# Altium schematic symbol library F101S3_KSDIY_V2.SchLib: 58 symbols
Pins are listed as number, name and electrical type; pins without a type are passive.

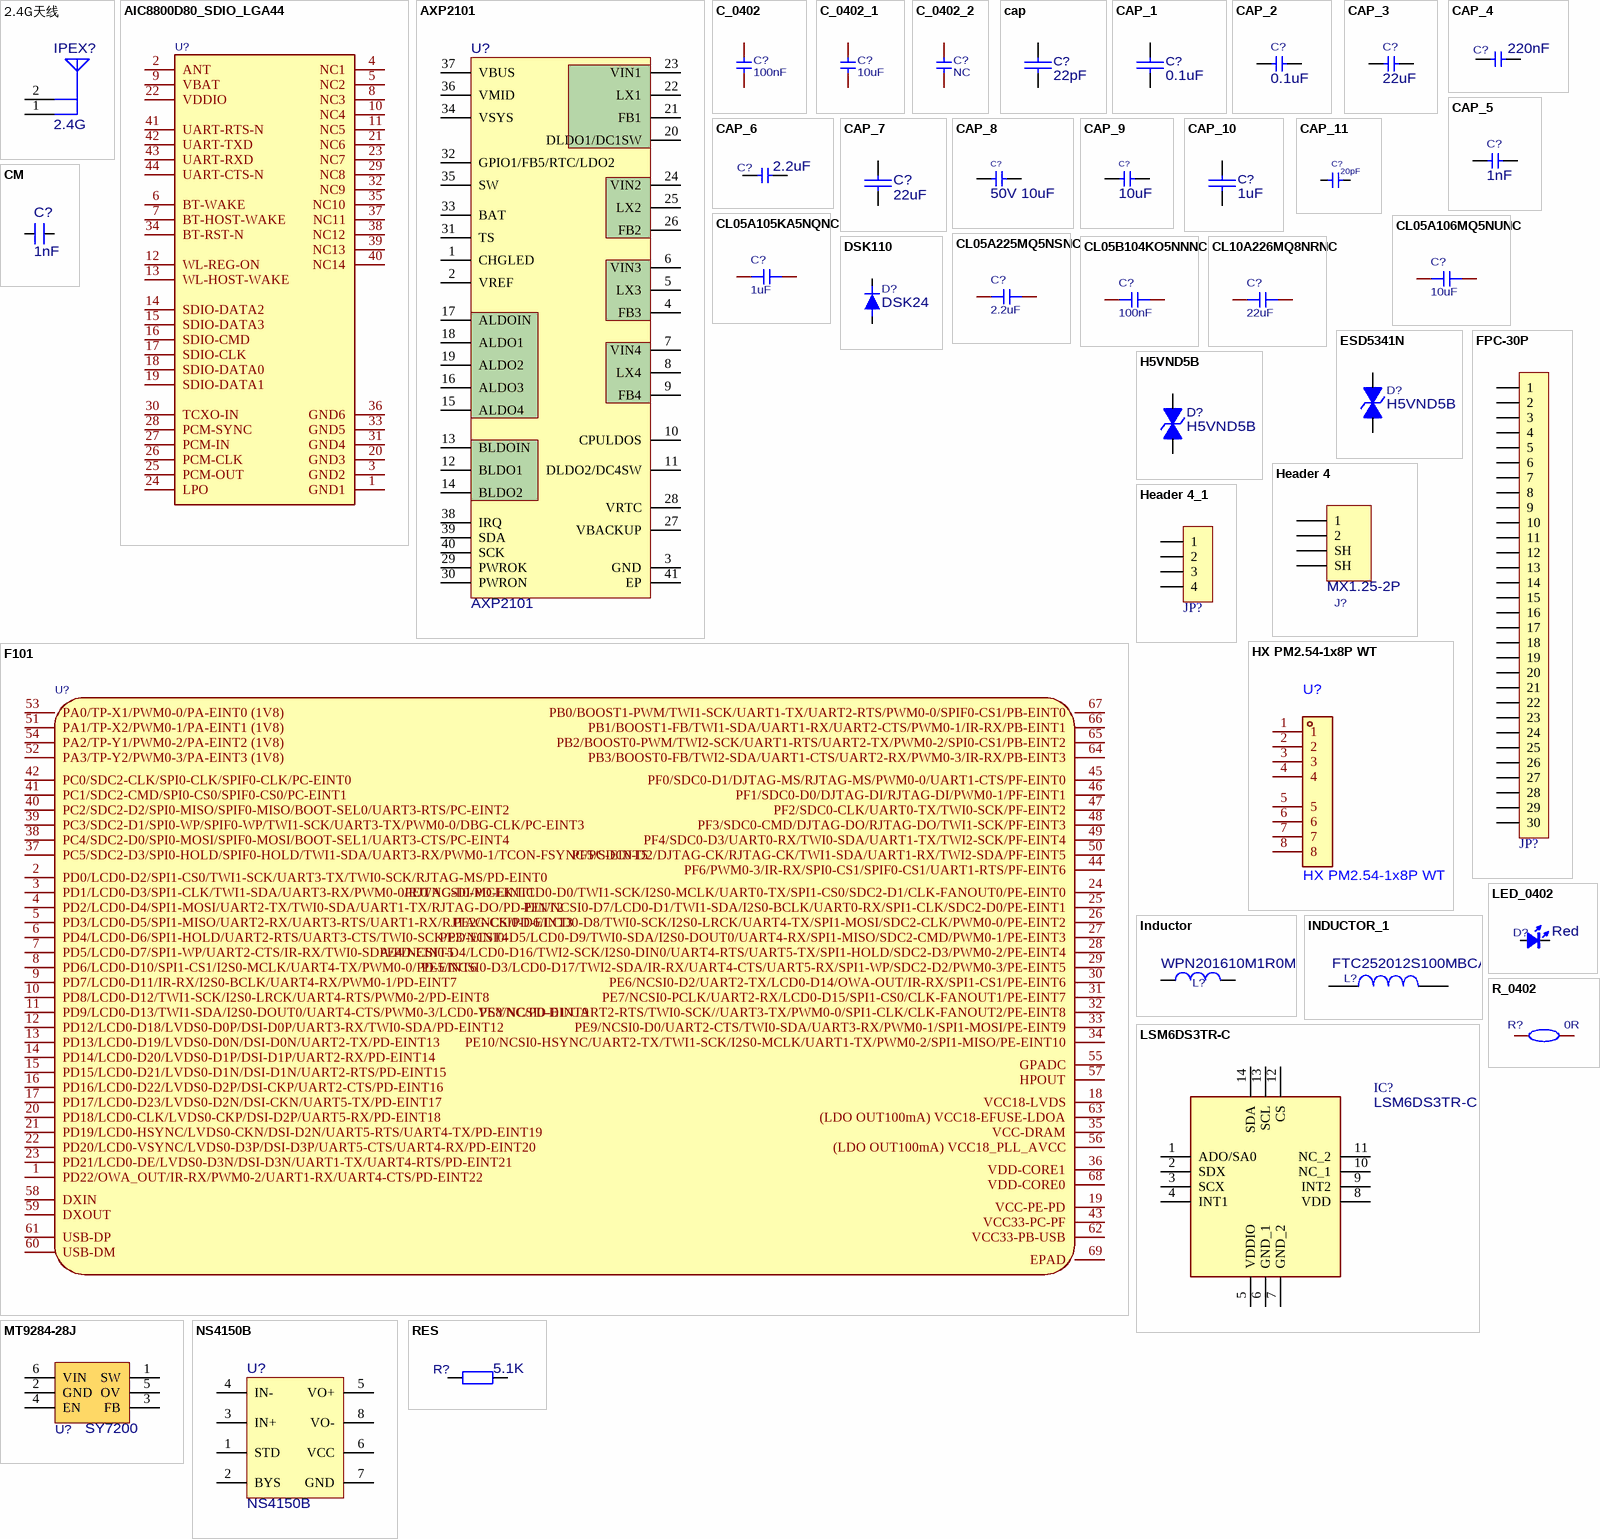
[diagram p0: symbols 2.4G天线 to RES]

## 2.4G天线
designator IPEX?, comment 2.4G
SMA-板载2.4G射频天线https://item.szlcsc.com/3441431.html?fromZone=s_s__%2522ipex1%2522; 版权归属: 源创客; BOM名称: 板载2.4G射频天线; 学习资源: www.ooocke.com
footprint SMA_IPEX
pins: 1 ANT, 2 GND

## AIC8800D80_SDIO_LGA44
designator U?
AIC8800D80 SDIO WiFi/BT module, LGA-44. Symbol from YuzukiNeko baseboard U3; footprint from BL-M8800MT1-40B - verify against module datasheet; Symbol: AIC8800D80_SDIO_LGA44; Add into BOM: yes; PCB Layer: Default; Device: AIC8800D80_SDIO_LGA44; Convert to PCB: yes; Value: AIC8800D80; FootprintName: WIRELM-SMD_BL-M8800MT1-40B
footprint WIRELM-SMD_BL-M8800MT1-40B
pins: 1 GND1, 2 ANT, 3 GND2, 4 NC1, 5 NC2, 6 BT-WAKE, 7 BT-HOST-WAKE, 8 NC3, 9 VBAT, 10 NC4, 11 NC5, 12 WL-REG-ON, 13 WL-HOST-WAKE, 14 SDIO-DATA2, 15 SDIO-DATA3, 16 SDIO-CMD, 17 SDIO-CLK, 18 SDIO-DATA0, 19 SDIO-DATA1, 20 GND3, 21 NC6, 22 VDDIO, 23 NC7, 24 LPO, 25 PCM-OUT, 26 PCM-CLK, 27 PCM-IN, 28 PCM-SYNC, 29 NC8, 30 TCXO-IN, 31 GND4, 32 NC9, 33 GND5, 34 BT-RST-N, 35 NC10, 36 GND6, 37 NC11, 38 NC12, 39 NC13, 40 NC14, 41 UART-RTS-N, 42 UART-TXD, 43 UART-RXD, 44 UART-CTS-N

## AXP2101
designator U?
A PMU designed by Allwinner; Manufacturer: x-powers; Add into BOM: yes; Symbol: AXP2101; Device: AXP2101; LCSC Part Name: AXP2101; Supplier Part: C3036461; Manufacturer Part: AXP2101; Supplier Footprint: QFN-40-EP(5x5); JLCPCB Part Class: 扩展库; Supplier: LCSC; Convert to PCB: yes
footprint QFN-40_L5.0-W5.0-P0.40-TL-EP3.4
3D model QFN-40_L5.0-W5.0-H0.9-P0.4-TL-EP
pins: 1 CHGLED, 2 VREF, 3 GND, 4 FB3, 5 LX3, 6 VIN3, 7 VIN4, 8 LX4, 9 FB4, 10 CPULDOS, 11 DLDO2/DC4SW, 12 BLDO1, 13 BLDOIN, 14 BLDO2, 15 ALDO4, 16 ALDO3, 17 ALDOIN, 18 ALDO1, 19 ALDO2, 20 DLDO1/DC1SW, 21 FB1, 22 LX1, 23 VIN1, 24 VIN2, 25 LX2, 26 FB2, 27 VBACKUP, 28 VRTC, 29 PWROK, 30 PWRON, 31 TS, 32 GPIO1/FB5/RTC/LDO2, 33 BAT, 34 VSYS, 35 SW, 36 VMID, 37 VBUS, 38 IRQ, 39 SDA, 40 SCK, 41 EP

## C_0402
designator C?, comment 100nF
Symbol: CAP; Device: C_0402; Add into BOM: yes; PCB Layer: Default; Origin 3D Model Title: CAPC1005X05L; Origin Footprint: CAP_0402 - G; ModelTransform: v2:[39.37007874015748,-9.642888182262625e-15,0,9.642888182262625e-15,39.37007874015748,0,0,0,39.37007874015748,0.0034,0.0032,0.5]; Convert to PCB: yes; Value: 100nF; FootprintName: CAP_0402 - G
footprint CAP_0402 - G
pins: 1, 2

## C_0402_1
designator C?, comment 10uF
Symbol: CAP; Device: C_0402; Add into BOM: yes; PCB Layer: Default; Origin 3D Model Title: CAPC1005X05L; Origin Footprint: CAP_0402 - G; ModelTransform: v2:[39.37007874015748,-9.642888182262625e-15,0,9.642888182262625e-15,39.37007874015748,0,0,0,39.37007874015748,0.0034,0.0032,0.5]; Convert to PCB: yes; Value: 10uF; FootprintName: CAP_0402 - G
footprint CAP_0402 - G
pins: 1, 2

## C_0402_2
designator C?, comment NC
Symbol: CAP; Device: C_0402; Add into BOM: yes; PCB Layer: Default; Origin 3D Model Title: CAPC1005X05L; Origin Footprint: CAP_0402 - G; ModelTransform: v2:[39.37007874015748,-9.642888182262625e-15,0,9.642888182262625e-15,39.37007874015748,0,0,0,39.37007874015748,0.0034,0.0032,0.5]; Convert to PCB: yes; Value: NC; FootprintName: CAP_0402 - G
footprint CAP_0402 - G
pins: 1, 2

## cap
designator C?, comment 22pF
footprint CAP_0402 - G
pins: 1, 2

## CAP_1
designator C?, comment 0.1uF
footprint CAP_0402 - G
pins: 1, 2

## CAP_2
designator C?, comment 0.1uF
Capacitor
footprint CAP_0402 - G
pins: 1, 2

## CAP_3
designator C?, comment 22uF
Capacitor
footprint 0603-C (Murata & TDK 0603,25V,±10%,X7R,SERAMIC)
pins: 1, 2

## CAP_4
designator C?, comment 220nF
Capacitor
footprint CAP_0402 - G
pins: 1, 2

## CAP_5
designator C?, comment 1nF
Capacitor
footprint CAP_0402 - G
pins: 1, 2

## CAP_6
designator C?, comment 2.2uF
Capacitor
footprint CAP_0402 - G
pins: 1, 2

## CAP_7
designator C?, comment 22uF
footprint 0603-C (Murata & TDK 0603,25V,±10%,X7R,SERAMIC)
pins: 1, 2

## CAP_8
designator C?, comment 50V 10uF
Capacitor
footprint 1206-C
pins: 1, 2

## CAP_9
designator C?, comment 10uF
Capacitor
footprint 0603-C (Murata & TDK 0603,25V,±10%,X7R,SERAMIC)
pins: 1, 2

## CAP_10
designator C?, comment 1uF
footprint CAP_0402 - G
pins: 1, 2

## CAP_11
designator C?, comment 20pF
Capacitor
footprint CAP_0402 - G
pins: 1, 2

## CL05A105KA5NQNC
designator C?, comment 1uF
容值:1uF;精度:±10%;额定电压:25V;温度系数:X5R;; Manufacturer: SAMSUNG(三星); Symbol: Capacitance; Device: CL05A105KA5NQNC; 3D Model: 36a51122f27c49738f86b3bfa98863e0聨0819f05c4eef4c71ace90d822a990e87; 3D Model Transform: 39.37,19.685,0,0,0,0,0,0,0; Add into BOM: yes; Tolerance: ±10%; Voltage Rating: 25V; Temperature Coefficient: X5R; PCB Layer: Default; ModelName: C0402_L1.0-W0.5-H0.5; Supplier Footprint: 0402; Value: 1uF; Convert to PCB: yes; LCSC Part Name: 1uF ±10% 25V; Supplier Part: C52923; Manufacturer Part: CL05A105KA5NQNC; JLCPCB Part Class: Basic Part; Datasheet: https://item.szlcsc.com/datasheet/CL05A105KA5NQNC/53938.html; Supplier: LCSC; FootprintName: C0402-NSK
footprint CAP_0402 - G
3D model C0402_L1.0-W0.5-H0.5
pins: 1, 2

## CL05A106MQ5NUNC
designator C?, comment 10uF
容值:10uF;精度:±20%;额定电压:6.3V;温度系数:X5R;; Manufacturer: SAMSUNG(三星); Symbol: Capacitance; Device: CL05A106MQ5NUNC; 3D Model: 36a51122f27c49738f86b3bfa98863e0聨0819f05c4eef4c71ace90d822a990e87; 3D Model Transform: 39.37,19.685,0,0,0,0,0,0,0; Add into BOM: yes; Tolerance: ±20%; Voltage Rating: 6.3V; Temperature Coefficient: X5R; PCB Layer: Default; ModelName: C0402_L1.0-W0.5-H0.5; Supplier Footprint: 0402; Value: 10uF; Convert to PCB: yes; LCSC Part Name: 10uF ±20% 6.3V; Supplier Part: C15525; Manufacturer Part: CL05A106MQ5NUNC; JLCPCB Part Class: Basic Part; Datasheet: https://item.szlcsc.com/datasheet/CL05A106MQ5NUNC/16204.html; Supplier: LCSC; FootprintName: C0402-NSK
footprint CAP_0402 - G
3D model C0402_L1.0-W0.5-H0.5
pins: 1, 2

## CL05A225MQ5NSNC
designator C?, comment 2.2uF
容值:2.2uF;精度:±20%;额定电压:6.3V;温度系数:X5R;; Manufacturer: SAMSUNG(三星); Symbol: Capacitance; Device: CL05A225MQ5NSNC; 3D Model: 36a51122f27c49738f86b3bfa98863e0聨0819f05c4eef4c71ace90d822a990e87; 3D Model Transform: 39.37,19.685,0,0,0,0,0,0,0; Add into BOM: yes; Tolerance: ±20%; Voltage Rating: 6.3V; Temperature Coefficient: X5R; PCB Layer: Default; ModelName: C0402_L1.0-W0.5-H0.5; Supplier Footprint: 0402; Value: 2.2uF; Convert to PCB: yes; LCSC Part Name: 2.2uF ±20% 6.3V; Supplier Part: C12530; Manufacturer Part: CL05A225MQ5NSNC; JLCPCB Part Class: Basic Part; Datasheet: https://item.szlcsc.com/datasheet/CL05A225MQ5NSNC/13164.html; Supplier: LCSC; FootprintName: C0402-NSK
footprint CAP_0402 - G
3D model C0402_L1.0-W0.5-H0.5
pins: 1, 2

## CL05B104KO5NNNC
designator C?, comment 100nF
容值:100nF;精度:±10%;额定电压:16V;温度系数:X7R;; Manufacturer: SAMSUNG(三星); Symbol: Capacitance; Device: CL05B104KO5NNNC; 3D Model: 36a51122f27c49738f86b3bfa98863e0聨0819f05c4eef4c71ace90d822a990e87; 3D Model Transform: 39.37,19.685,0,0,0,0,0,0,0; Add into BOM: yes; Tolerance: ±10%; Voltage Rating: 16V; Temperature Coefficient: X7R; PCB Layer: Default; ModelName: C0402_L1.0-W0.5-H0.5; Supplier Footprint: 0402; Value: 100nF; Convert to PCB: yes; LCSC Part Name: 100nF ±10% 16V; Supplier Part: C1525; Manufacturer Part: CL05B104KO5NNNC; JLCPCB Part Class: Basic Part; Datasheet: https://item.szlcsc.com/datasheet/CL05B104KO5NNNC/1877.html; Supplier: LCSC; FootprintName: C0402-NSK
footprint CAP_0402 - G
3D model C0402_L1.0-W0.5-H0.5
pins: 1, 2

## CL10A226MQ8NRNC
designator C?, comment 22uF
容值:22uF;精度:±20%;额定电压:6.3V;温度系数:X5R;; Manufacturer: SAMSUNG(三星); Symbol: Capacitance; Device: CL10A226MQ8NRNC; Add into BOM: yes; 3D Model: ac125912035d415993ca9572d50418b1; 3D Model Transform: 62.992,31.496,0,0,0,0,0,0,0; Tolerance: ±20%; Voltage Rating: 6.3V; Temperature Coefficient: X5R; PCB Layer: Default; ModelName: C0603_L1.6-W0.8-H0.8; Convert to PCB: yes; Value: 22uF; Supplier Footprint: 0603; LCSC Part Name: 22uF ±20% 6.3V; Supplier Part: C59461; Manufacturer Part: CL10A226MQ8NRNC; JLCPCB Part Class: Basic Part; Datasheet: https://item.szlcsc.com/datasheet/CL10A226MQ8NRNC/60514.html; Supplier: LCSC; FootprintName: C0603-NSK
footprint 0603-C (Murata & TDK 0603,25V,±10%,X7R,SERAMIC)
3D model C0603_L1.6-W0.8-H0.8
pins: 1, 2

## CM
designator C?, comment 1nF
Cap SMD; Value: 103
footprint CAP_0402 - G
pins: 1, 2

## DSK110
designator D?, comment DSK24
footprint SOD-123F (二极管); pin to pad A>1 K>2
pins: A, K

## ESD5341N
designator D?, comment H5VND5B
ESD二极管-单向
footprint SOD-523F_L1.7-W0.9-LS1.7-BI
pins: 1, 2

## F101
designator U?
Symbol: F101; Add into BOM: yes; PCB Layer: Default; ModelId: f133f686dbbc4c2a801de1546189e211聨0819f05c4eef4c71ace90d822a990e87; ModelName: QFN-68_L7.0-W7.0-P0.35-TL-EP4.5; ModelTransform: 276.3773992490768,276.3773992490768,30.70859960693866,0,0,0,0,0,0; Device: F101; Convert to PCB: yes; FootprintName: QFN-68_L7.0-W7.0-P0.35-TL-EP4.5
footprint QFN-68_L7.0-W7.0-P0.35-TL-EP4.5
pins: 1 PD22/OWA_OUT/IR-RX/PWM0-2/UART1-RX/UART4-CTS/PD-EINT22, 2 PD0/LCD0-D2/SPI1-CS0/TWI1-SCK/UART3-TX/TWI0-SCK/RJTAG-MS/PD-EINT0, 3 PD1/LCD0-D3/SPI1-CLK/TWI1-SDA/UART3-RX/PWM0-0/RJTAG-DI/PD-EINT1, 4 PD2/LCD0-D4/SPI1-MOSI/UART2-TX/TWI0-SDA/UART1-TX/RJTAG-DO/PD-EINT2, 5 PD3/LCD0-D5/SPI1-MISO/UART2-RX/UART3-RTS/UART1-RX/RJTAG-CK/PD-EINT3, 6 PD4/LCD0-D6/SPI1-HOLD/UART2-RTS/UART3-CTS/TWI0-SCK/PD-EINT4, 7 PD5/LCD0-D7/SPI1-WP/UART2-CTS/IR-RX/TWI0-SDA/PD-EINT5, 8 PD6/LCD0-D10/SPI1-CS1/I2S0-MCLK/UART4-TX/PWM0-0/PD-EINT6, 9 PD7/LCD0-D11/IR-RX/I2S0-BCLK/UART4-RX/PWM0-1/PD-EINT7, 10 PD8/LCD0-D12/TWI1-SCK/I2S0-LRCK/UART4-RTS/PWM0-2/PD-EINT8, 11 PD9/LCD0-D13/TWI1-SDA/I2S0-DOUT0/UART4-CTS/PWM0-3/LCD0-VSYNC/PD-EINT9, 12 PD12/LCD0-D18/LVDS0-D0P/DSI-D0P/UART3-RX/TWI0-SDA/PD-EINT12, 13 PD13/LCD0-D19/LVDS0-D0N/DSI-D0N/UART2-TX/PD-EINT13, 14 PD14/LCD0-D20/LVDS0-D1P/DSI-D1P/UART2-RX/PD-EINT14, 15 PD15/LCD0-D21/LVDS0-D1N/DSI-D1N/UART2-RTS/PD-EINT15, 16 PD16/LCD0-D22/LVDS0-D2P/DSI-CKP/UART2-CTS/PD-EINT16, 17 PD17/LCD0-D23/LVDS0-D2N/DSI-CKN/UART5-TX/PD-EINT17, 18 VCC18-LVDS, 19 VCC-PE-PD, 20 PD18/LCD0-CLK/LVDS0-CKP/DSI-D2P/UART5-RX/PD-EINT18, 21 PD19/LCD0-HSYNC/LVDS0-CKN/DSI-D2N/UART5-RTS/UART4-TX/PD-EINT19, 22 PD20/LCD0-VSYNC/LVDS0-D3P/DSI-D3P/UART5-CTS/UART4-RX/PD-EINT20, 23 PD21/LCD0-DE/LVDS0-D3N/DSI-D3N/UART1-TX/UART4-RTS/PD-EINT21, 24 PE0/NCSI0-MCLK/LCD0-D0/TWI1-SCK/I2S0-MCLK/UART0-TX/SPI1-CS0/SDC2-D1/CLK-FANOUT0/PE-EINT0, 25 PE1/NCSI0-D7/LCD0-D1/TWI1-SDA/I2S0-BCLK/UART0-RX/SPI1-CLK/SDC2-D0/PE-EINT1, 26 PE2/NCSI0-D6/LCD0-D8/TWI0-SCK/I2S0-LRCK/UART4-TX/SPI1-MOSI/SDC2-CLK/PWM0-0/PE-EINT2, 27 PE3/NCSI0-D5/LCD0-D9/TWI0-SDA/I2S0-DOUT0/UART4-RX/SPI1-MISO/SDC2-CMD/PWM0-1/PE-EINT3, 28 PE4/NCSI0-D4/LCD0-D16/TWI2-SCK/I2S0-DIN0/UART4-RTS/UART5-TX/SPI1-HOLD/SDC2-D3/PWM0-2/PE-EINT4, 29 PE5/NCSI0-D3/LCD0-D17/TWI2-SDA/IR-RX/UART4-CTS/UART5-RX/SPI1-WP/SDC2-D2/PWM0-3/PE-EINT5, 30 PE6/NCSI0-D2/UART2-TX/LCD0-D14/OWA-OUT/IR-RX/SPI1-CS1/PE-EINT6, 31 PE7/NCSI0-PCLK/UART2-RX/LCD0-D15/SPI1-CS0/CLK-FANOUT1/PE-EINT7, 32 PE8/NCSI0-D1/UART2-RTS/TWI0-SCK//UART3-TX/PWM0-0/SPI1-CLK/CLK-FANOUT2/PE-EINT8, 33 PE9/NCSI0-D0/UART2-CTS/TWI0-SDA/UART3-RX/PWM0-1/SPI1-MOSI/PE-EINT9, 34 PE10/NCSI0-HSYNC/UART2-TX/TWI1-SCK/I2S0-MCLK/UART1-TX/PWM0-2/SPI1-MISO/PE-EINT10, 35 VCC-DRAM, 36 VDD-CORE1, 37 PC5/SDC2-D3/SPI0-HOLD/SPIF0-HOLD/TWI1-SDA/UART3-RX/PWM0-1/TCON-FSYNC/PC-EINT5, 38 PC4/SDC2-D0/SPI0-MOSI/SPIF0-MOSI/BOOT-SEL1/UART3-CTS/PC-EINT4, 39 PC3/SDC2-D1/SPI0-WP/SPIF0-WP/TWI1-SCK/UART3-TX/PWM0-0/DBG-CLK/PC-EINT3, 40 PC2/SDC2-D2/SPI0-MISO/SPIF0-MISO/BOOT-SEL0/UART3-RTS/PC-EINT2, 41 PC1/SDC2-CMD/SPI0-CS0/SPIF0-CS0/PC-EINT1, 42 PC0/SDC2-CLK/SPI0-CLK/SPIF0-CLK/PC-EINT0, 43 VCC33-PC-PF, 44 PF6/PWM0-3/IR-RX/SPI0-CS1/SPIF0-CS1/UART1-RTS/PF-EINT6, 45 PF0/SDC0-D1/DJTAG-MS/RJTAG-MS/PWM0-0/UART1-CTS/PF-EINT0, 46 PF1/SDC0-D0/DJTAG-DI/RJTAG-DI/PWM0-1/PF-EINT1, 47 PF2/SDC0-CLK/UART0-TX/TWI0-SCK/PF-EINT2, 48 PF3/SDC0-CMD/DJTAG-DO/RJTAG-DO/TWI1-SCK/PF-EINT3, 49 PF4/SDC0-D3/UART0-RX/TWI0-SDA/UART1-TX/TWI2-SCK/PF-EINT4, 50 PF5/SDC0-D2/DJTAG-CK/RJTAG-CK/TWI1-SDA/UART1-RX/TWI2-SDA/PF-EINT5, 51 PA1/TP-X2/PWM0-1/PA-EINT1 (1V8), 52 PA3/TP-Y2/PWM0-3/PA-EINT3 (1V8), 53 PA0/TP-X1/PWM0-0/PA-EINT0 (1V8), 54 PA2/TP-Y1/PWM0-2/PA-EINT2 (1V8), 55 GPADC, 56 (LDO OUT100mA) VCC18_PLL_AVCC, 57 HPOUT, 58 DXIN, 59 DXOUT, 60 USB-DM, 61 USB-DP, 62 VCC33-PB-USB, 63 (LDO OUT100mA) VCC18-EFUSE-LDOA, 64 PB3/BOOST0-FB/TWI2-SDA/UART1-CTS/UART2-RX/PWM0-3/IR-RX/PB-EINT3, 65 PB2/BOOST0-PWM/TWI2-SCK/UART1-RTS/UART2-TX/PWM0-2/SPI0-CS1/PB-EINT2, 66 PB1/BOOST1-FB/TWI1-SDA/UART1-RX/UART2-CTS/PWM0-1/IR-RX/PB-EINT1, 67 PB0/BOOST1-PWM/TWI1-SCK/UART1-TX/UART2-RTS/PWM0-0/SPIF0-CS1/PB-EINT0, 68 VDD-CORE0, 69 EPAD

## FPC-30P
designator JP?, comment FPC1.0-30P  (value not drawn)
FPC连接器; 版权归属: 源创客; BOM名称: FPC连接器; 学习资源: www.ooocke.com
footprint FPC1.25A-LI-30P (Footprint not found)
footprint FPC0.5 2H-WS-30P (长：19.2mm，宽：5.2mm，高：2mm)
footprint FPC1.0-2H-WS-30P (翻盖FPC，脚距1mm，不含脚（长34.9mm，宽5.2mm，高1.96mm）)
pins: 1, 2, 3, 4, 5, 6, 7, 8, 9, 10, 11, 12, 13, 14, 15, 16, 17, 18, 19, 20, 21, 22, 23, 24, 25, 26, 27, 28, 29, 30

## H5VND5B
designator D?
ESD二极管-单向
footprint SOD-523F_L1.7-W0.9-LS1.7-BI
pins: 1, 2

## Header 4
designator J?, comment MX1.25-2P
Header, 4-Pin; LatestRevisionDate: 17-Jul-2002; LatestRevisionNote: Re-released for DXP Platform.; Publisher: Altium Limited
signal-integrity model Connector
footprint MX 1.25-WS-2P (长：7.65mm，宽：4.2mm，高：3.4mm)
pins: 0 SH, 0 SH, 1, 2

## Header 4_1
designator JP?, comment HDR-1X4  (value not drawn)
4P接插件; 版权归属: 源创客; BOM名称: 4P接插件; 学习资源: www.ooocke.com
footprint MX 1.25-WI-4P (长：6.75mm，宽：1.8mm，高：3.3mm)
footprint MX 1.25-LI-4P (长：6.75mm，宽：3.2mm，高：4.2mm)
footprint MX 1.25-WS-4P (长：10.15mm，宽：4.2mm，高：3.4mm)
footprint MX 1.25-LS-4P (长：9.75m，宽：3.7mm，高：4.7mm)
pins: 1, 2, 3, 4

## HX PM2.54-1x8P WT
designator U?
配套排针：HX PZ2.54-1x8P系列 1x8P 间距:2.54mm 卧贴 / 插孔结构:1x8P / 间距:2.54mm / 行距:- / 圆孔/方孔:方孔 / 安装方式:卧贴 / 排数:单排 / 总孔位数:8P / 额定电流:3A / 额定电压:1kV / 插孔方向:顶部 / 塑高:8.5mm / 触头材质:黄铜 / 触头镀层:金 / 工作温度:-40℃~+105℃ / 型号:HX PM2.54-1x8P WT / LCSC C46061772 / 厂牌:hanxia(韩下)
footprint HDR-SMD_8P-P2.54-H-F-W8.5 (PCB footprint)
pins: 1, 2, 3, 4, 5, 6, 7, 8

## Inductor
designator L?, comment WPN201610M1R0MT
贴片功率电感 2.2uH-20%-252010(2.5*2.0*1.0mm); Code_IEC: 1005; Published: 8-Jun-2000; LatestRevisionDate: 17-Jul-2002; LatestRevisionNote: Re-released for DXP Platform.; PackageReference: 0402-A; Publisher: Altium Limited; Code_JEITA: 0402
footprint IND_CB2518_MM
pins: 1, 2

## INDUCTOR_1
designator L?, comment FTC252012S100MBCA
footprint IND_CB2518_MM
pins: 1, 2

## LED_0402
designator D?, comment Red
LED
footprint 0603/1608-LED
pins: 1 A, 2 K

## LSM6DS3TR-C
designator IC?
Integrated Circuit; Manufacturer_Name: STMicroelectronics; Datasheet Link: http://www.st.com/resource/en/datasheet/lsm6ds3tr-c.pdf; Manufacturer_Part_Number: LSM6DS3TR-C; Mouser Part Number: 511-LSM6DS3TR-C; Mouser Price/Stock: https://www.mouser.co.uk/ProductDetail/STMicroelectronics/LSM6DS3TR-C?qs=u4fy%2FsgLU9NHwPlhP3LTBw%3D%3D; Arrow Part Number: LSM6DS3TR-C; Arrow Price/Stock: https://www.arrow.com/en/products/lsm6ds3tr-c/stmicroelectronics?region=nac
footprint LGA-14(2.5X3X0.86)
pins: 1 ADO/SA0, 2 SDX, 3 SCX, 4 INT1, 5 VDDIO, 6 GND_1, 7 GND_2, 8 VDD, 9 INT2, 10 NC_1, 11 NC_2, 12 CS, 13 SCL, 14 SDA

## MT9284-28J
designator U?, comment SY7200
footprint SOT-23-6
pins: 1 SW, 2 GND, 3 FB, 4 EN, 5 OV, 6 VIN

## NS4150B
designator U?
footprint MSOP8_N (塑封体长3mm，宽3mm，脚距0.65)
pins: 1 STD, 2 BYS, 3 IN+, 4 IN-, 5 VO+, 6 VCC, 7 GND, 8 VO-

## R_0402
designator R?, comment 0R
Symbol: RES; Device: R_0402; Add into BOM: yes; PCB Layer: Default; Origin 3D Model Title: RESC1005X03L; Origin Footprint: RES_0402 -G; ModelTransform: v2:[39.37007874015748,-9.642888182262625e-15,0,9.642888182262625e-15,39.37007874015748,0,0,0,39.37007874015748,0.0034,0.0033,0]; Convert to PCB: yes; Value: 0R; FootprintName: RES_0402 -G
footprint RES_0402 -G
pins: 1, 2

## RES
designator R?, comment 5.1K
普通电阻
footprint RES_0402 -G
pins: 1, 2

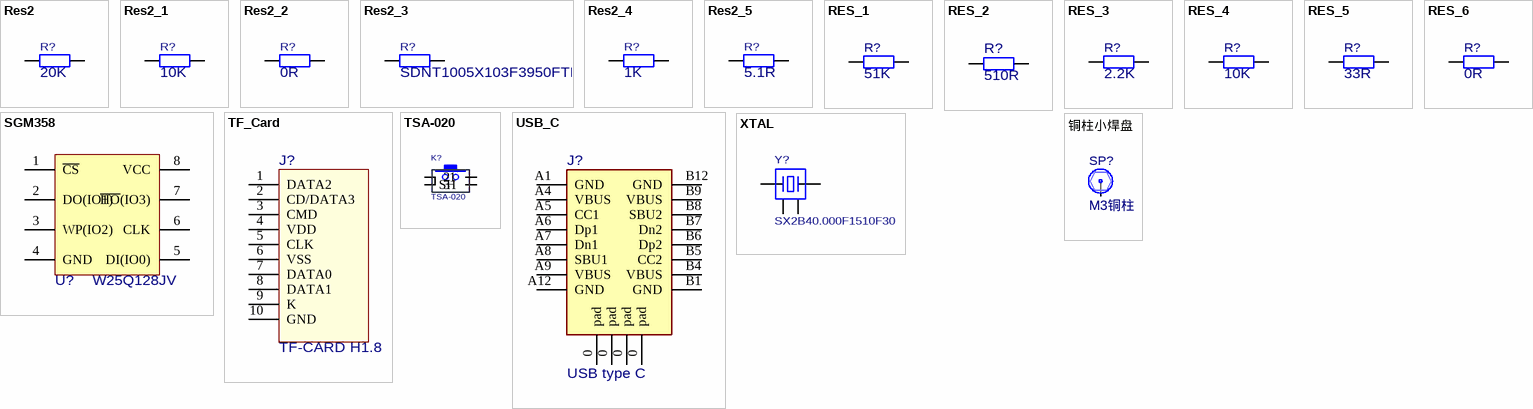
[diagram p1: symbols Res2 to 铜柱小焊盘]

## Res2
designator R?, comment 20K
Resistor; Published: *; LatestRevisionDate: *; LatestRevisionNote: *; PackageReference: *; Publisher: *
footprint RES_0402 -G
pins: 1, 2
2 alternate drawings of the same symbol

## Res2_1
designator R?, comment 10K
Resistor; Published: *; LatestRevisionDate: *; LatestRevisionNote: *; PackageReference: *; Publisher: *
footprint RES_0402 -G
pins: 1, 2
2 alternate drawings of the same symbol

## Res2_2
designator R?, comment 0R
Resistor; Published: *; LatestRevisionDate: *; LatestRevisionNote: *; PackageReference: *; Publisher: *
footprint RES_0402 -G
pins: 1, 2
2 alternate drawings of the same symbol

## Res2_3
designator R?, comment SDNT1005X103F3950FTF
10K 热敏电阻; Published: *; LatestRevisionDate: *; LatestRevisionNote: *; PackageReference: *; Publisher: *
footprint RES_0402 -G
pins: 1, 2
2 alternate drawings of the same symbol

## Res2_4
designator R?, comment 1K
Resistor; Published: *; LatestRevisionDate: *; LatestRevisionNote: *; PackageReference: *; Publisher: *
footprint RES_0402 -G
pins: 1, 2
2 alternate drawings of the same symbol

## Res2_5
designator R?, comment 5.1R
Resistor; Published: *; LatestRevisionDate: *; LatestRevisionNote: *; PackageReference: *; Publisher: *
footprint 0603-R
pins: 1, 2
2 alternate drawings of the same symbol

## RES_1
designator R?, comment 51K
普通电阻
footprint RES_0402 -G
pins: 1, 2

## RES_2
designator R?, comment 510R
普通电阻
footprint RES_0402 -G
pins: 1, 2

## RES_3
designator R?, comment 2.2K
普通电阻
footprint RES_0402 -G
pins: 1, 2

## RES_4
designator R?, comment 10K
普通电阻
footprint RES_0402 -G
pins: 1, 2

## RES_5
designator R?, comment 33R
普通电阻
footprint RES_0402 -G
pins: 1, 2

## RES_6
designator R?, comment 0R
普通电阻
footprint RES_0402 -G
pins: 1, 2

## SGM358
designator U?, comment W25Q128JV
footprint SOP8W (5.3*8.3*1.8mm（长宽高）)
pins: 1 ~{CS}, 2 DO(IO1), 3 WP(IO2), 4 GND, 5 DI(IO0), 6 CLK, 7 ~{HO}(IO3), 8 VCC

## TF_Card
designator J?, comment TF-CARD H1.8
TF卡座; 版权归属: 源创客; BOM名称: TF卡座; 学习资源: www.ooocke.com
footprint TF卡座
pins: 1 DATA2, 2 CD/DATA3, 3 CMD, 4 VDD, 5 CLK, 6 VSS, 7 DATA0, 8 DATA1, 9 K, 10 GND

## TSA-020
designator K?
footprint SW-SMD_TSA020XXXXXX
pins: 0 SH, 1, 2, 3

## USB_C
designator J?, comment USB type C
footprint USB Type-C-16Pin_A
pins: 0 pad, 0 pad, 0 pad, 0 pad, A1 GND, A4 VBUS, A5 CC1, A6 Dp1, A7 Dn1, A8 SBU1, A9 VBUS, A12 GND, B1 GND, B4 VBUS, B5 CC2, B6 Dp2, B7 Dn2, B8 SBU2, B9 VBUS, B12 GND

## XTAL
designator Y?, comment SX2B40.000F1510F30
24Mhz
footprint XTAL-2520
pins: 1, 2, 3, 4
2 alternate drawings of the same symbol

## 铜柱小焊盘
designator SP?, comment M3铜柱
铜柱; 版权归属: 源创客; BOM名称: 铜柱; 学习资源: www.ooocke.com
footprint M3x4_L (M3铜柱，长：4mm)
footprint M3x5_L (M3铜柱，长：5mm)
footprint M3x6_L (M3铜柱，长：6mm)
footprint M3x7_L (M3铜柱，长：7mm)
footprint M3x8_L (M3铜柱，长：8mm)
footprint M3x9_L (M3铜柱，长：9mm)
footprint M3x10_L (M3铜柱，长：10mm)
footprint M3x11_L (M3铜柱，长：11mm)
footprint M3x12_L (M3铜柱，长：12mm)
footprint M3x13_L (M3铜柱，长：13mm)
footprint M3x14_L (M3铜柱，长：14mm)
footprint M3x15_L (M3铜柱，长：15mm)
footprint M3x16_L (M3铜柱，长：16mm)
footprint M3x17_L (M3铜柱，长：17mm)
footprint M3x18_L (M3铜柱，长：18mm)
footprint M3x19_L (M3铜柱，长：19mm)
footprint M3x20_L (M3铜柱，长：20mm)
footprint M3x21_L (M3铜柱，长：21mm)
footprint M3x22_L (M3铜柱，长：22mm)
footprint M3x23_L (M3铜柱，长：23mm)
footprint M3x24_L (M3铜柱，长：24mm)
footprint M3x25_L (M3铜柱，长：25mm)
footprint M3x26_L (M3铜柱，长：26mm)
footprint M3x27_L (M3铜柱，长：27mm)
footprint M3x28_L (M3铜柱，长：28mm)
footprint M3x30_L (M3铜柱，长：30mm)
footprint M3x32_L (M3铜柱，长：32mm)
footprint M3x35_L (M3铜柱，长：35mm)
footprint M3x40_L (M3铜柱，长：40mm)
footprint M3x45_L (M3铜柱，长：45mm)
footprint M3x50_L (M3铜柱，长：50mm)
footprint M3x55_L (M3铜柱，长：55mm)
footprint M3x60_L (M3铜柱，长：60mm)
footprint M3x65_L (M3铜柱，长：65mm)
pins: 1